# Altium schematic symbol library DRV8849RHHR.SchLib: 1 symbol
Pins are listed as number, name and electrical type; pins without a type are passive.

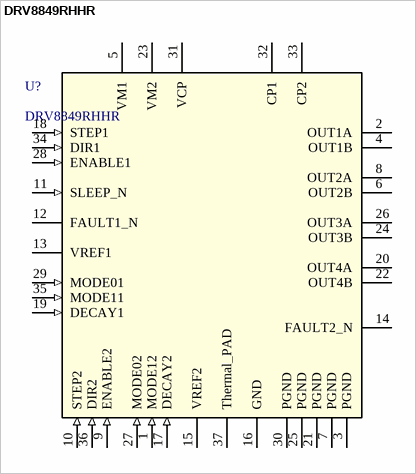
[diagram p0: symbol DRV8849RHHR]

## DRV8849RHHR
designator U?
38-V 1.5-A dual stepper motor driver with smart tune and integrated current sensing 36-VQFN -40 to 125; Manufacturer_Name: Texas Instruments; TYPE: TYPE; RefDes: RefDes; Copyright: Copyright (C) 2025 Ultra Librarian. All rights reserved.; Manufacturer_Part_Number: DRV8849RHHR
footprint RHH0036H-IPC_A
pins: 1 MODE12 (in), 2 OUT1A, 3 PGND (power), 4 OUT1B, 5 VM1 (power), 6 OUT2B, 7 PGND (power), 8 OUT2A, 9 ENABLE2 (in), 10 STEP2 (in), 11 SLEEP_N (in), 12 FAULT1_N (oc), 13 VREF1, 14 FAULT2_N (oc), 15 VREF2, 16 GND (power), 17 DECAY2 (in), 18 STEP1 (in), 19 DECAY1 (in), 20 OUT4A, 21 PGND (power), 22 OUT4B, 23 VM2 (power), 24 OUT3B, 25 PGND (power), 26 OUT3A, 27 MODE02 (in), 28 ENABLE1 (in), 29 MODE01 (in), 30 PGND (power), 31 VCP, 32 CP1, 33 CP2, 34 DIR1 (in), 35 MODE11 (in), 36 DIR2 (in), 37 Thermal_PAD